# Altium footprint library SBR10A45SP5-13.PcbLib: 3 footprints
Each footprint in its own frame and in the unit in brackets; x right, y up, seen from the top. Pads: shape width x height; smd on the part's side, far side on the other; paste and mask are expansions set on the pad; w line width, h text height; cw(c..) or ccw(c..) is an arc to the next point about the centre after c.
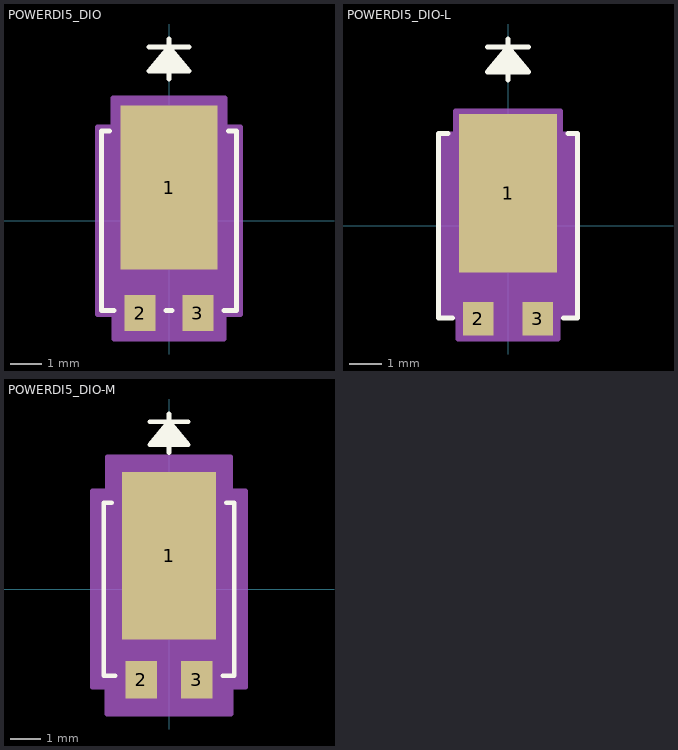
[diagram p0: the footprints below, top view; thin cyan lines are the x and y axes]

## POWERDI5_DIO [mil]
pads (3):
  rect 122x205 smd paste+0 mask+0: 1(0,41.5)
  rect 39x45 smd paste+0 mask+0: 2(-36.22,-115.5) 3(36.22,-115.5)
Top Overlay:
  lines w6: -74.1,112.5 -84.5,112.5 -84.5,-112.5 -68.82,-112.5 ; -25,217.5 25,217.5 ; -20,187.5 0,217.5 ; -15,187.5 0,217.5 ; -10,187.5 0,217.5 ; -5,187.5 0,217.5 ; -3.62,-112.5 3.62,-112.5 ; 0,177.5 0,227.5 ; 5,187.5 0,217.5 ; 10,187.5 0,217.5 ; 15,187.5 0,217.5 ; 20,187.5 0,217.5 ; 68.82,-112.5 84.5,-112.5 84.5,112.5 74.1,112.5 ; 0,217.5 25,187.5 -25,187.5 0,217.5
  text ".Designator" at -137.5,-25 h50
Mechanical 13:
  lines w1: -25,217.5 25,217.5 ; -20,187.5 0,217.5 ; -15,187.5 0,217.5 ; -10,187.5 0,217.5 ; -5,187.5 0,217.5 ; 0,177.5 0,227.5 ; 5,187.5 0,217.5 ; 10,187.5 0,217.5 ; 15,187.5 0,217.5 ; 20,187.5 0,217.5 ; 0,217.5 25,187.5 -25,187.5 0,217.5 ; -79.5,-107.5 79.5,-107.5 79.5,107.5 -79.5,107.5 -79.5,-107.5
  text ".Designator" at -137.5,-25 h50
Mechanical 15:
  region: -68.72,-117.5 -89.5,-117.5 -89.5,117.5 -70,117.5 -70,154 70,154 70,117.5 89.5,117.5 89.5,-117.5 68.72,-117.5 68.72,-148 -68.72,-148
  region: 79.5,-107.5 -79.5,-107.5 -79.5,107.5 79.5,107.5
  lines w6: -89.5,-117.5 -89.5,117.5 -70,117.5 -70,154 70,154 70,117.5 89.5,117.5 89.5,-117.5 68.72,-117.5 68.72,-148 -68.72,-148 -68.72,-117.5 -89.5,-117.5
3D body "POWERDI5_DIO.step": height 47.09, standoff 0, extent -79.49,-130 79.49,130

## POWERDI5_DIO-L [mil]
pads (3):
  rect 120x193 smd paste+0 mask+0: 1(0,39.5)
  rect 37x41 smd paste+0 mask+0: 2(-36.22,-113.5) 3(36.22,-113.5)
Top Overlay:
  lines w6: -73.1,112.5 -84.5,112.5 -84.5,-112.5 -67.82,-112.5 ; -25,217.5 25,217.5 ; -20,187.5 0,217.5 ; -15,187.5 0,217.5 ; -10,187.5 0,217.5 ; -5,187.5 0,217.5 ; 0,177.5 0,227.5 ; 5,187.5 0,217.5 ; 10,187.5 0,217.5 ; 15,187.5 0,217.5 ; 20,187.5 0,217.5 ; 67.82,-112.5 84.5,-112.5 84.5,112.5 73.1,112.5 ; 0,217.5 25,187.5 -25,187.5 0,217.5
  text ".Designator" at -137.5,-25 h50
Mechanical 13:
  lines w1: -25,217.5 25,217.5 ; -20,187.5 0,217.5 ; -15,187.5 0,217.5 ; -10,187.5 0,217.5 ; -5,187.5 0,217.5 ; 0,177.5 0,227.5 ; 5,187.5 0,217.5 ; 10,187.5 0,217.5 ; 15,187.5 0,217.5 ; 20,187.5 0,217.5 ; 0,217.5 25,187.5 -25,187.5 0,217.5 ; -79.5,-107.5 79.5,-107.5 79.5,107.5 -79.5,107.5 -79.5,-107.5
  text ".Designator" at -137.5,-25 h50
Mechanical 15:
  region: -60.72,-111.5 -83.5,-111.5 -83.5,111.5 -64,111.5 -64,140 64,140 64,111.5 83.5,111.5 83.5,-111.5 60.72,-111.5 60.72,-138 -60.72,-138
  region: 79.5,-107.5 -79.5,-107.5 -79.5,107.5 79.5,107.5
  lines w6: -83.5,-111.5 -83.5,111.5 -64,111.5 -64,140 64,140 64,111.5 83.5,111.5 83.5,-111.5 60.72,-111.5 60.72,-138 -60.72,-138 -60.72,-111.5 -83.5,-111.5
3D body "POWERDI5_DIO.step": height 47.09, standoff 0, extent -79.49,-130 79.49,130

## POWERDI5_DIO-M [mil]
pads (3):
  rect 122x217 smd paste+0 mask+0: 1(0,43.5)
  rect 41x49 smd paste+0 mask+0: 2(-36.22,-117.5) 3(36.22,-117.5)
Top Overlay:
  lines w6: -74.1,112.5 -84.5,112.5 -84.5,-112.5 -69.82,-112.5 ; -25,217.5 25,217.5 ; -20,187.5 0,217.5 ; -15,187.5 0,217.5 ; -10,187.5 0,217.5 ; -5,187.5 0,217.5 ; 0,177.5 0,227.5 ; 5,187.5 0,217.5 ; 10,187.5 0,217.5 ; 15,187.5 0,217.5 ; 20,187.5 0,217.5 ; 69.82,-112.5 84.5,-112.5 84.5,112.5 74.1,112.5 ; 0,217.5 25,187.5 -25,187.5 0,217.5
  text ".Designator" at -137.5,-25 h50
Mechanical 13:
  lines w1: -25,217.5 25,217.5 ; -20,187.5 0,217.5 ; -15,187.5 0,217.5 ; -10,187.5 0,217.5 ; -5,187.5 0,217.5 ; 0,177.5 0,227.5 ; 5,187.5 0,217.5 ; 10,187.5 0,217.5 ; 15,187.5 0,217.5 ; 20,187.5 0,217.5 ; 0,217.5 25,187.5 -25,187.5 0,217.5 ; -79.5,-107.5 79.5,-107.5 79.5,107.5 -79.5,107.5 -79.5,-107.5
  text ".Designator" at -137.5,-25 h50
Mechanical 15:
  region: -80.72,-127.5 -99.5,-127.5 -99.5,127.5 -80,127.5 -80,172 80,172 80,127.5 99.5,127.5 99.5,-127.5 80.72,-127.5 80.72,-162 -80.72,-162
  region: 79.5,-107.5 -79.5,-107.5 -79.5,107.5 79.5,107.5
  lines w6: -99.5,-127.5 -99.5,127.5 -80,127.5 -80,172 80,172 80,127.5 99.5,127.5 99.5,-127.5 80.72,-127.5 80.72,-162 -80.72,-162 -80.72,-127.5 -99.5,-127.5
3D body "POWERDI5_DIO.step": height 47.09, standoff 0, extent -79.49,-130 79.49,130